# Altium schematic symbol library CI's.SchLib: 28 symbols
Pins are listed as number, name and electrical type; pins without a type are passive.

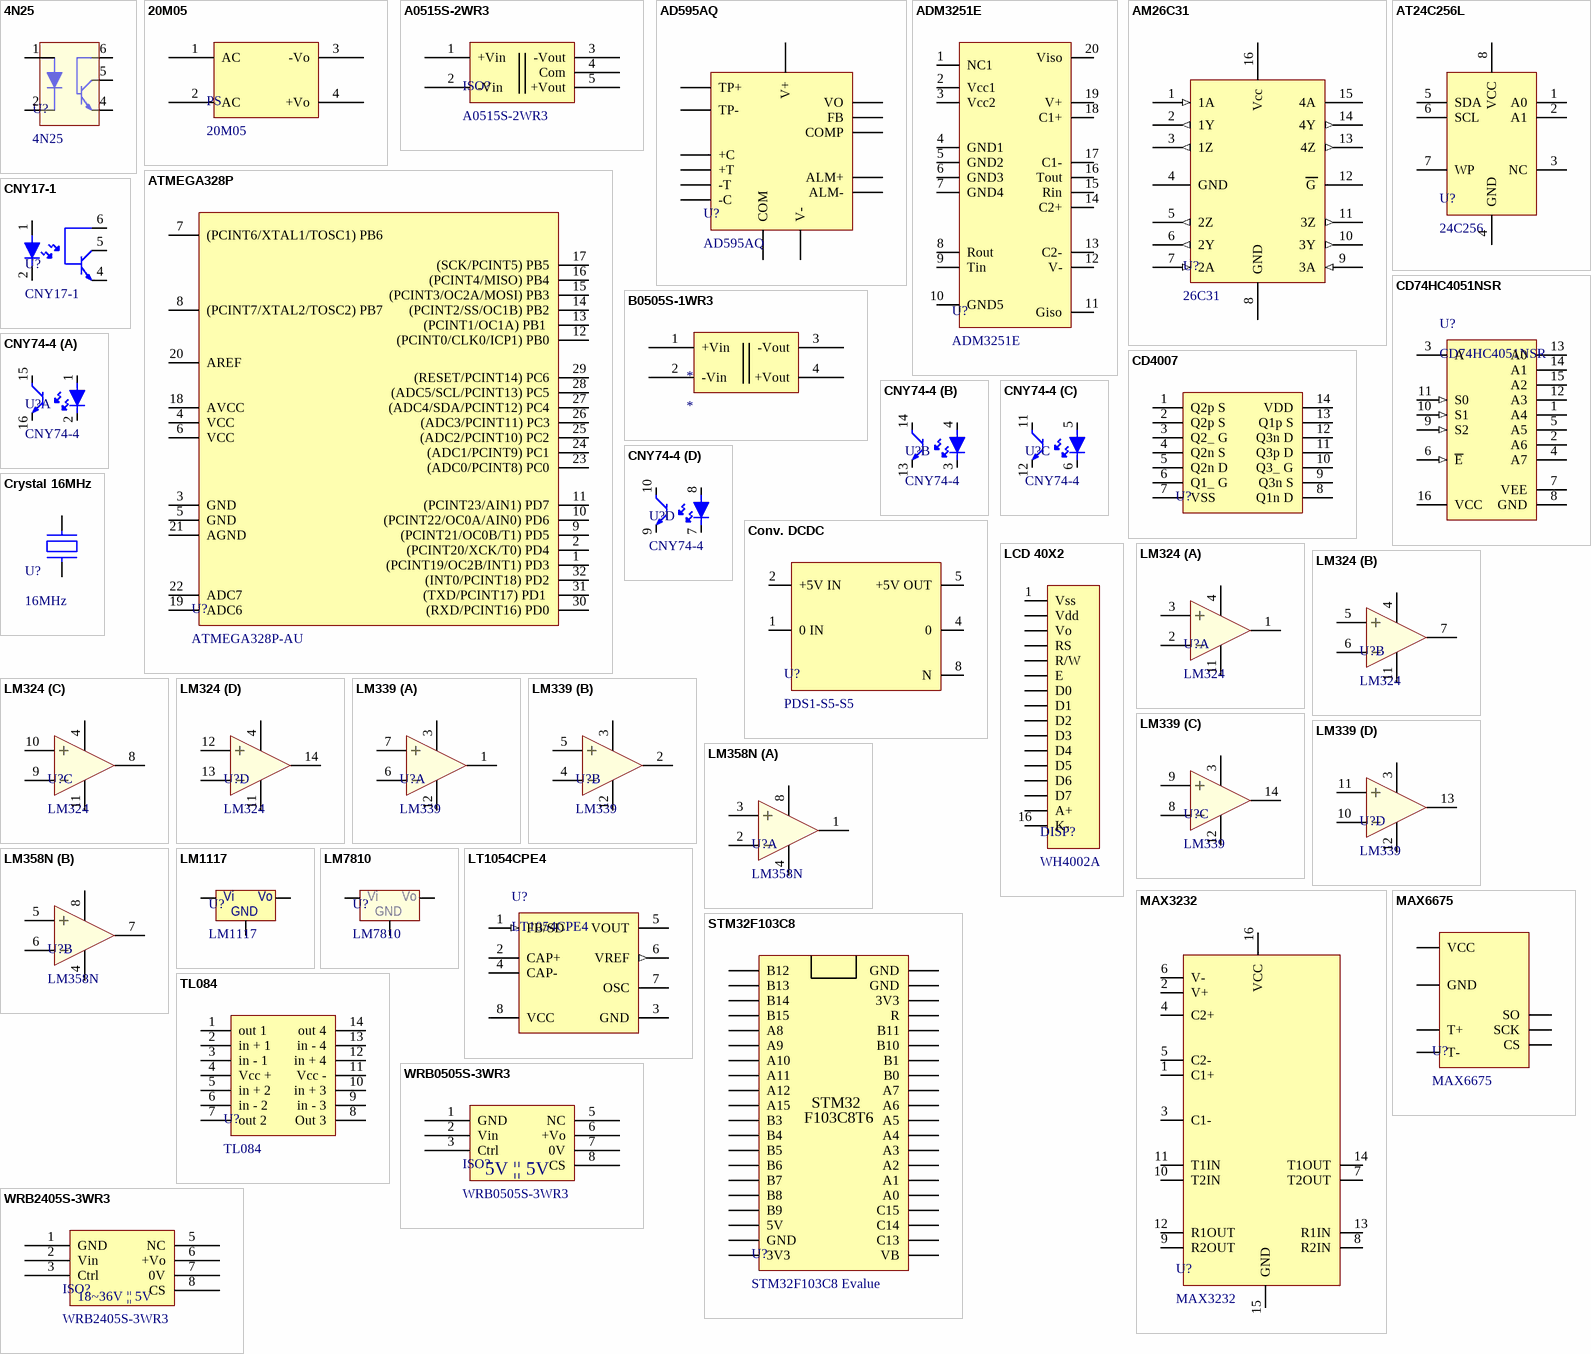
[diagram p0: symbols 4N25 to WRB2405S-3WR3]

## 4N25
designator U?
Optocoupler, Phototransistor Output, with Base Connection; Datasheet: https://www.vishay.com/docs/83725/4n25.pdf
footprint DIP06-300(100) (DIP; 6 Leads; Row Spacing 7.62 mm; Pitch 2.54 mm)
pins: 1, 2, 4, 5, 6

## 20M05
designator PS
footprint PCBComponent_1
pins: 1 AC, 2 AC, 3 -Vo, 4 +Vo

## A0515S-2WR3
designator ISO?
Isolador 5V +-15V
footprint A0515S-2WR3 (Isolator 5V +-15V)
pins: 1 +Vin, 2 -Vin, 3 -Vout, 4 Com, 5 +Vout

## AD595AQ
designator U?
Monolithic Thermocouple Amplifiers  with Cold Junction Compensation
footprint DIP14-300(100) (DIP, 14-Leads, Row Spacing 7.62mm, Pitch 2.54mm)
pins: 1 TP+, 2 +C, 3 +T, 4 COM, 5 -T, 6 -C, 7 V-, 8 FB, 9 VO, 10 COMP, 11 V+, 12 ALM+, 13 ALM-, 14 TP-

## ADM3251E
designator U?
2.5 kV fully isolated (power and data) RS-232 transceiver
footprint SOIC20-300(50) (SOIC 20 Leads; Row Spacing 7.62 mm; Pitch 1.27 mm; 3D André L´Hérault)
pins: 1 NC1, 2 Vcc1, 3 Vcc2, 4 GND1, 5 GND2, 6 GND3, 7 GND4, 8 Rout, 9 Tin, 10 GND5, 11 Giso, 12 V-, 13 C2-, 14 C2+, 15 Rin, 16 Tout, 17 C1-, 18 C1+, 19 V+, 20 Viso

## AM26C31
designator U?, comment 26C31
Quadruple Differential Line Driver; Manufacturer Partnumber: AM26C31IDR; Digikey Partnumber: 296-24344-1-ND; Datasheet: https://www.ti.com/lit/gpn/am26c31
footprint SOIC16-150(50) (SOIC 16 Leads; Row Spacing 3.81 mm; Pitch 1.27 mm; 3D André L´Hérault)
pins: 1 1A (in), 2 1Y (out), 3 1Z (out), 4 GND, 5 2Z (out), 6 2Y (out), 7 2A (in), 8 GND, 9 3A (in), 10 3Y (out), 11 3Z (out), 12 G, 13 4Z (out), 14 4Y (out), 15 4A, 16 Vcc

## AT24C256L
designator U?, comment 24C256
256 kb I2C CMOS Serial EEPROM
footprint DIP08-300(100) (DIP; 8 Leads; Row Spacing 7.62 mm; Pitch 2.54 mm)
pins: 1 A0, 2 A1, 3 NC, 4 GND, 5 SDA, 6 SCL, 7 WP, 8 VCC

## ATMEGA328P
designator U?, comment ATMEGA328P-AU
8-bit AVR Microcontroller with 32K Bytes In-System  Programmable Flash
footprint LQFP-32
pins: 1 (PCINT19/OC2B/INT1) PD3, 2 (PCINT20/XCK/T0) PD4, 3 GND, 4 VCC, 5 GND, 6 VCC, 7 (PCINT6/XTAL1/TOSC1) PB6, 8 (PCINT7/XTAL2/TOSC2) PB7, 9 (PCINT21/OC0B/T1) PD5, 10 (PCINT22/OC0A/AIN0) PD6, 11 (PCINT23/AIN1) PD7, 12 (PCINT0/CLK0/ICP1) PB0, 13 (PCINT1/OC1A) PB1 , 14 (PCINT2/SS/OC1B) PB2, 15 (PCINT3/OC2A/MOSI) PB3, 16 (PCINT4/MISO) PB4, 17 (SCK/PCINT5) PB5, 18 AVCC, 19 ADC6, 20 AREF, 21 AGND, 22 ADC7, 23 (ADC0/PCINT8) PC0, 24 (ADC1/PCINT9) PC1, 25 (ADC2/PCINT10) PC2, 26 (ADC3/PCINT11) PC3, 27 (ADC4/SDA/PCINT12) PC4, 28 (ADC5/SCL/PCINT13) PC5, 29 (RESET/PCINT14) PC6, 30 (RXD/PCINT16) PD0, 31 (TXD/PCINT17) PD1 , 32 (INT0/PCINT18) PD2

## B0505S-1WR3
designator *
Isolador 5V - 5V
pins: 1 +Vin, 2 -Vin, 3 -Vout, 4 +Vout

## CD74HC4051NSR
designator U?
High Speed CMOS 8-Channel Analog Multiplexer/Demultiplexer, NS0016A, LARGE T&R; Manufacturer: Texas Instruments; Bandwidth(Max)(MHz): 180; VCC(Max)(V): 6; Ron(Typ)(Ohms): 45; Configuration: 1 X 1：8 MUX; Rating: Catalog; Ron(Max)(Ohms): 130; VCC(Min)(V): 2; Crosstalk: Yes; DatasheetVersion: SCHS122J; Generic Part Number: CD74HC4051; PackageReference: NS0016A; Operating Temperature Range(C): -55 to 125; PackageVersion: http://www.ti.com/lit/ml/msop002a/msop002a.pdf; Output Type: CMOS
footprint NS0016A_L (SOIC,16-Leads,Body 10.5x5.6mm,Pitch 1.27mm,IPC High Density)
footprint NS0016A_N (SOIC,16-Leads,Body 10.5x5.6mm,Pitch 1.27mm,IPC Medium Density)
footprint NS0016A_M (SOIC,16-Leads,Body 10.5x5.6mm,Pitch 1.27mm,IPC Low Density)
pins: 1 A4, 2 A6, 3 A, 4 A7, 5 A5, 6 ~{E} (in), 7 VEE (power), 8 GND (power), 9 S2 (in), 10 S1 (in), 11 S0 (in), 12 A3, 13 A0, 14 A1, 15 A2, 16 VCC (power)

## CD4007
designator U?  (value not drawn)
CMOS Dual Complementary Pair Plus Inverter
footprint DIP14-300(100) (DIP, 14-Leads, Row Spacing 7.62mm, Pitch 2.54mm)
pins: 1 Q2p S, 2 Q2p S, 3 Q2_ G, 4 Q2n S, 5 Q2n D, 6 Q1_ G, 7 VSS, 8 Q1n D, 9 Q3n S, 10 Q3_ G, 11 Q3p D, 12 Q3n D, 13 Q1p S, 14 VDD

## CNY17-1
designator U?
Optocoupler, Phototransistor Output, with Base Connection
footprint DIP06-300(100) (DIP; 6 Leads; Row Spacing 7.62 mm; Pitch 2.54 mm)
pins: 1, 2, 4, 5, 6

## CNY74-4
designator U?
Optocoupler, Phototransistor Output (Multichannel)
footprint DIP16-300(100) (DIP, 16-Leads, Row Spacing 7.62mm, Pitch 2.54mm, Body 22.86x6.35mm)
part A pins: 1, 2, 15, 16
part B pins: 3, 4, 13, 14
part C pins: 5, 6, 11, 12
part D pins: 7, 8, 9, 10

## Conv. DCDC
designator U?, comment PDS1-S5-S5
Isolated Module DC DC Converter 1 Output 5V 200mA 4.5V - 5.5V Input
footprint PDS1-S5-S5
pins: 1 0 IN, 2 +5V IN, 4 0, 5 +5V OUT, 8 N

## Crystal 16MHz
designator U?, comment 16MHz
16MHZ OSCILATOR CRYSTAL
footprint HC49 (Crystals 16.0MHz 13.4 x 4.9 x 4.3mm)
pins: 1, 2

## LCD 40X2
designator DISP?, comment WH4002A
Modulo LCD 40x2 Digitos Winstar Backlight Azul; Partnumber: WH4002A; Datasheet: https://www.winstar.com.tw/pt/products/character-lcd-display-module/40x2-lcd.html
footprint LCD40X2 (Winstar WH4002A)
pins: 1 Vss, 2 Vdd, 3 Vo, 4 RS, 5 R/W, 6 E, 7 D0, 8 D1, 9 D2, 10 D3, 11 D4, 12 D5, 13 D6, 14 D7, 15 A+, 16 K-

## LM324
designator U?
General Purpose Amplifier 4 Circuit 14-SOIC
footprint SOIC14-150(50) (SOIC 14 Leads; Row Spacing 3.81 mm; Pitch 1.27 mm; 3D André L´Hérault)
part A pins: 1, 2, 3, 4, 11
part B pins: 4, 5, 6, 7, 11
part C pins: 4, 8, 9, 10, 11
part D pins: 4, 11, 12, 13, 14

## LM339
designator U?
Quad Differential Comparators DIP-14
footprint DIP14-300(100) (DIP, 14-Leads, Row Spacing 7.62mm, Pitch 2.54mm)
part A pins: 1, 3, 6, 7, 12
part B pins: 2, 3, 4, 5, 12
part C pins: 3, 8, 9, 12, 14
part D pins: 3, 10, 11, 12, 13

## LM358N
designator U?
Dual-Operational Amplifiers; Partnumber: LM358N/NOPB; Datasheet: https://www.ti.com/lit/gpn/lm358-n; Digikey Partnumber: LM358NNS/NOPB-ND
footprint DIP08-300(100) (DIP; 8 Leads; Row Spacing 7.62 mm; Pitch 2.54 mm)
part A pins: 1, 2, 3, 4, 8
part B pins: 4, 5, 6, 7, 8

## LM1117
designator U?
LM1117 800-mA Low-Dropout Linear Regulator
footprint SOT-223-4
pins: 1, 2, 3
text: Vi; Vo; GND

## LM7810
designator U?
Linear voltage regulator 10V 1A
footprint TO-252-3
pins: 1, 2, 3
text: Vi; Vo; GND

## LT1054CPE4
designator U?
-5 V, Buck / Boost Charge Pump, 100 mA, 3.5 to 15 V Input, 0 to 70 degC, 8-pin DIP (P8), Pb-Free (RoHS); Manufacturer: Texas Instruments; Vout(Min)(V): -4.7; Vout(Max)(V): -5.2; Vin(Max)(V): 15; Iout(Max)(A): 0.1; Vin(Min)(V): 3.5; Switching Frequency(Max)(kHz): 35; Iq(Typ)(mA): 2.5; Topology: Buck/Boost; PackageDescription: 8-Pin Plastic In-Line, Body 9.59 x 6.35 mm, 2.54 mm Pitch; Mounting Technology: Through Hole; ComponentLink2Description: Datasheet; DatasheetVersion: SLVS033F; ComponentLink2URL: http://www.ti.com/general/docs/lit/getliterature.tsp?genericPartNumber=LT1054&fileType=pdf; Preset Vout(V): -5; ComponentLink3URL: http://www.ti.com/litv/pdf/mpdi001b; Code_JEDEC: MS-001; PartNumber: LT1054CPE4; PackageReference: P8; ComponentLink3Description: Package Specification; Eco-Plan: Pb-Free (RoHS); ComponentLink1URL: http://www.ti.com/; PackageVersion: 4040082/E; ComponentLink1Description: Manufacturer URL
footprint TI-P8 (DIP, 8-Leads, Body 9.59x6.35mm, Pitch 2.54mm)
pins: 1 FB/SD (in), 2 CAP+, 3 GND (power), 4 CAP-, 5 VOUT (power), 6 VREF (out), 7 OSC, 8 VCC (power)

## MAX3232
designator U?
MAX3232 3-V to 5.5-V Multichannel RS-232 Line Driver/Receiver  With ±15-kV ESD Protection
footprint DIP16-300(100) (DIP, 16-Leads, Row Spacing 7.62mm, Pitch 2.54mm, Body 22.86x6.35mm)
pins: 1 C1+, 2 V+, 3 C1-, 4 C2+, 5 C2-, 6 V-, 7 T2OUT, 8 R2IN, 9 R2OUT, 10 T2IN, 11 T1IN, 12 R1OUT, 13 R1IN, 14 T1OUT, 15 GND, 16 VCC

## MAX6675
designator U?
Cold-Junction-Compensated K-Thermocoupleto-Digital Converter (0°C to +1024°C)
footprint DIP08-300(100) (DIP; 8 Leads; Row Spacing 7.62 mm; Pitch 2.54 mm)
footprint SOIC08-150(50) (SOIC 8 Leads; Row Spacing 3.81 mm; Pitch 1.27 mm; 3D André L´Hérault)
pins: 1 GND, 2 T-, 3 T+, 4 VCC, 5 SCK, 6 CS, 7 SO

## STM32F103C8
designator U?, comment STM32F103C8 Evalue
pins: 1 B12, 2 B13, 3 B14, 4 B15, 5 A8, 6 A9, 7 A10, 8 A11, 9 A12, 10 A15, 11 B3, 12 B4, 13 B5, 14 B6, 15 B7, 16 B8, 17 B9, 18 5V, 19 GND, 20 3V3, 21 VB, 22 C13, 23 C14, 24 C15, 25 A0, 26 A1, 27 A2, 28 A3, 29 A4, 30 A5, 31 A6, 32 A7, 33 B0, 34 B1, 35 B10, 36 B11, 37 R, 38 3V3, 39 GND, 40 GND
text: STM32; F103C8T6

## TL084
designator U?
Amplificador Operacional
footprint SOIC14-150(50) (SOIC 14 Leads; Row Spacing 3.81 mm; Pitch 1.27 mm; 3D André L´Hérault)
pins: 1 out 1, 2 in + 1, 3 in - 1, 4 Vcc +, 5 in + 2, 6 in - 2, 7 out 2, 8 Out 3, 9 in - 3, 10 in + 3, 11 Vcc -, 12 in + 4, 13 in - 4, 14 out 4

## WRB0505S-3WR3
designator ISO?
footprint WRB0505S-3WR3
pins: 1 GND, 2 Vin, 3 Ctrl, 5 NC, 6 +Vo, 7 0V, 8 CS
text: 5V || 5V

## WRB2405S-3WR3
designator ISO?
footprint WRB2405S-3WR3
pins: 1 GND, 2 Vin, 3 Ctrl, 5 NC, 6 +Vo, 7 0V, 8 CS
text: 18~36V || 5V